# EAGLE library part CON-USB-F-MICRO-B-2 (library dp_devices.v6)
Micro USB based on molex SD-47589-001
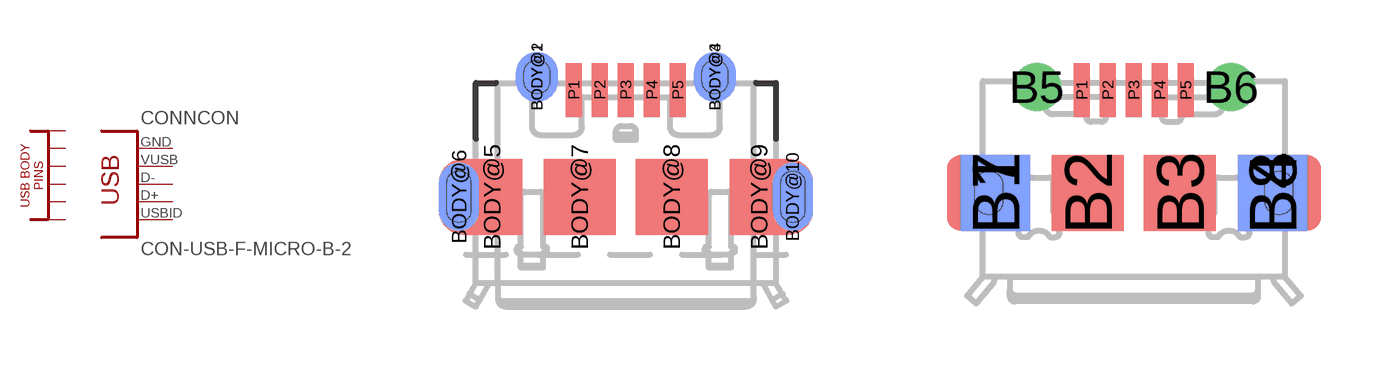
[diagram p196: symbol with the pads of CON_USB_MICRO-B-2-SD-47589-001; footprints CON_USB_MICRO-B-2-SD-47589-001, CON_USB_MICRO-B-3]

Designator prefix CONN; gates BGND=USB_BODY_5P CON=CONN_USB

## CON-USB-F-MICRO-B-2  [CON_USB_MICRO-B-2-SD-47589-001]
BODY@1  BGND:P$1  pas
BODY@2  BGND:P$1  pas
BODY@3  BGND:P$2  pas
BODY@4  BGND:P$2  pas
BODY@5  BGND:P$3  pas
BODY@6  BGND:P$3  pas
BODY@7  BGND:P$4  pas
BODY@8  BGND:P$5  pas
BODY@9  BGND:P$6  pas
BODY@10  BGND:P$6  pas
P1  CON:VUSB
P2  CON:D-
P3  CON:D+
P4  CON:USBID
P5  CON:GND

## CON-USB-F-MICRO-B-2-SD-47589-001_ALIKE  [CON_USB_MICRO-B-3]
B1  BGND:P$1  pas
B2  BGND:P$2  pas
B3  BGND:P$3  pas
B4  BGND:P$4  pas
B5  BGND:P$5  pas
B6  BGND:P$6  pas
B7  BGND:P$1  pas
B8  BGND:P$4  pas
P1  CON:VUSB
P2  CON:D-
P3  CON:D+
P4  CON:USBID
P5  CON:GND

## Footprint CON_USB_MICRO-B-2-SD-47589-001 (pad centres in mm)
MOLEX SD-47589-001 1.10 mm from center
smd 1.05 x 1.25: BODY@1 -2.225,3.35; BODY@3 2.225,3.35
smd 1.05 x 1.25 bottom: BODY@2 -2.225,3.35; BODY@4 2.225,3.35
smd 1.48 x 1.9: BODY@5 -3.338,0.35; BODY@9 3.338,0.35
smd 1 x 1.7 bottom: BODY@6 -4.175,0.35; BODY@10 4.175,0.35
smd 1.8 x 1.9: BODY@7 -1.15,0.35; BODY@8 1.15,0.35
smd 0.4 x 1.35: P1 -1.3,3.025; P2 -0.65,3.025; P3 0,3.025; P4 0.65,3.025; P5 1.3,3.025

## Footprint CON_USB_MICRO-B-3 (pad centres in mm)
Similar to MOLEX SD-47589-001 1.78 mm from center
smd 1.73 x 1.9: B1 -3.463,-0.325; B4 3.463,-0.325
smd 1.8 x 1.9: B2 -1.15,-0.325; B3 1.15,-0.325
drill 0.7: B5 -2.425,2.325; B6 2.425,2.325
smd 1.73 x 1.9 bottom: B7 -3.463,-0.325; B8 3.463,-0.325
smd 0.4 x 1.35: P1 -1.3,2.25; P2 -0.65,2.25; P3 0,2.25; P4 0.65,2.25; P5 1.3,2.25